# Altium footprint library INDC5038X343N.PcbLib: 1 footprints
Each footprint in its own frame and in the unit in brackets; x right, y up, seen from the top. Pads: shape width x height; smd on the part's side, far side on the other; paste and mask are expansions set on the pad; w line width, h text height; cw(c..) or ccw(c..) is an arc to the next point about the centre after c.
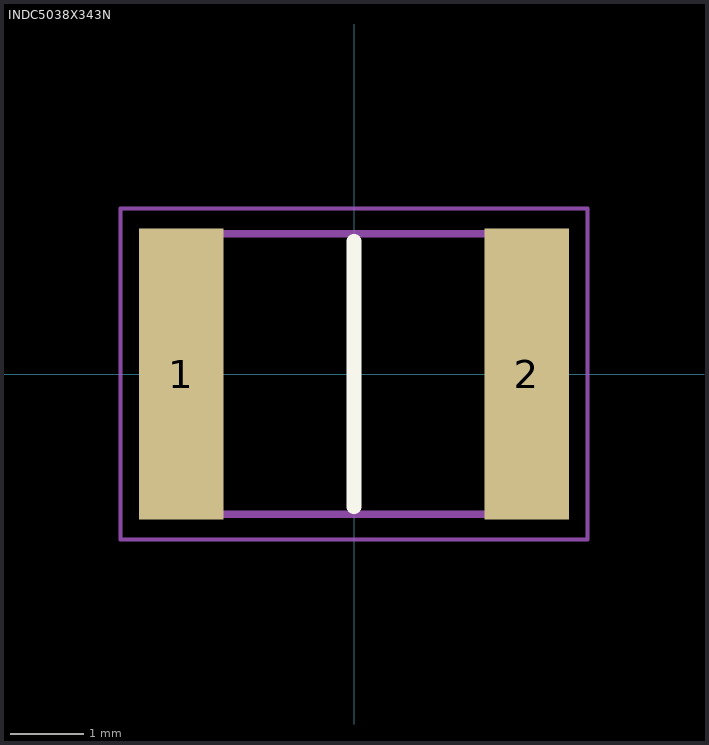
[diagram p0: the footprint, top view; thin cyan lines are the x and y axes]

## INDC5038X343N [mm]
pads (2):
  rect 1.15x3.95 smd: 1(-2.35,0) 2(2.35,0)
Top Overlay:
  lines w0.2: 0,-1.805 0,1.805
Mechanical 15:
  lines w0.1: -2.475,-1.905 2.475,-1.905 2.475,1.905 -2.475,1.905 -2.475,-1.905
Mechanical 20:
  lines w0.05: -3.175,-2.25 3.175,-2.25 3.175,2.25 -3.175,2.25 -3.175,-2.25